# Altium footprint library NXJ2S2405MC-R7.PcbLib: 3 footprints
Each footprint in its own frame and in the unit in brackets; x right, y up, seen from the top. Pads: shape width x height; smd on the part's side, far side on the other; paste and mask are expansions set on the pad; w line width, h text height; cw(c..) or ccw(c..) is an arc to the next point about the centre after c.
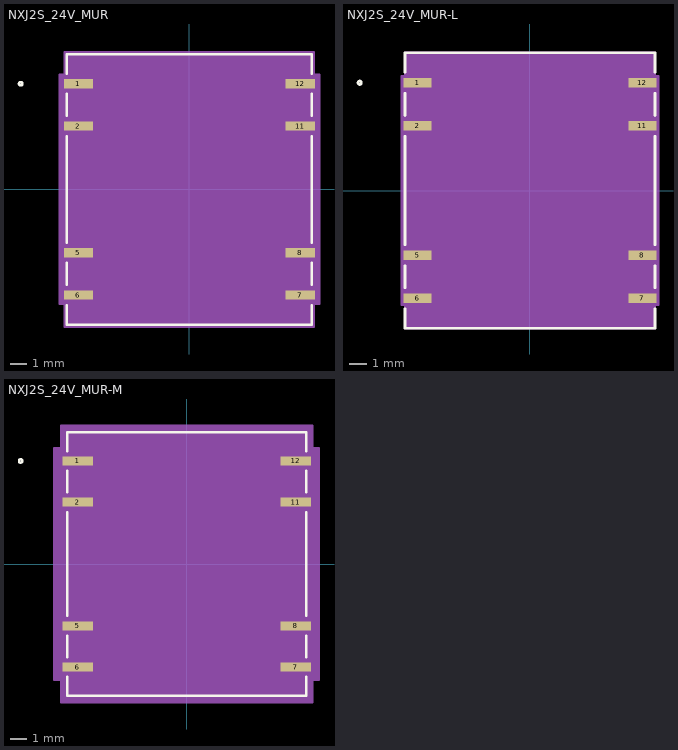
[diagram p0: the footprints below, top view; thin cyan lines are the x and y axes]

## NXJ2S_24V_MUR [mil]
pads (8):
  rect 69x22 smd paste+0 mask+0: 1(-262.5,250) 2(-262.5,150) 5(-262.5,-150) 6(-262.5,-250) 7(262.5,-250) 8(262.5,-150) 11(262.5,150) 12(262.5,250)
Top Overlay:
  circle w6: c-399,250 r4
  lines w6: -290,-274.1 -290,-320 290,-320 290,-274.1 ; -290,-225.9 -290,-174.1 ; -290,-125.9 -290,125.9 ; -290,174.1 -290,225.9 ; -290,274.1 -290,320 290,320 290,274.1 ; 290,-225.9 290,-174.1 ; 290,-125.9 290,125.9 ; 290,174.1 290,225.9
  text ".Designator" at -137.5,-25 h50
Mechanical 13:
  circle w1: c-228,250 r3
  lines w1: -12,315 ccw(c0,315) 12,315 ; -285,-315 285,-315 285,315 -285,315 -285,-315
  text ".Designator" at -137.5,-25 h50
Mechanical 15:
  region: -295,-271 -307,-271 -307,271 -295,271 -295,325 295,325 295,271 307,271 307,-271 295,-271 295,-325 -295,-325
  lines w6: -307,-271 -307,271 -295,271 -295,325 295,325 295,271 307,271 307,-271 295,-271 295,-325 -295,-325 -295,-271 -307,-271
3D body "NXJ2S_24V_MUR.step": height 191.1, standoff 0, extent -285,-315 285,315

## NXJ2S_24V_MUR-L [mil]
pads (8):
  rect 65x22 smd paste+0 mask+0: 1(-260.5,250) 2(-260.5,150) 5(-260.5,-150) 6(-260.5,-250) 7(260.5,-250) 8(260.5,-150) 11(260.5,150) 12(260.5,250)
Top Overlay:
  circle w6: c-395,250 r4
  lines w6: -290,-274.1 -290,-320 290,-320 290,-274.1 ; -290,-225.9 -290,-174.1 ; -290,-125.9 -290,125.9 ; -290,174.1 -290,225.9 ; -290,274.1 -290,320 290,320 290,274.1 ; 290,-225.9 290,-174.1 ; 290,-125.9 290,125.9 ; 290,174.1 290,225.9
  text ".Designator" at -137.5,-25 h50
Mechanical 13:
  circle w1: c-228,250 r3
  lines w1: -12,315 ccw(c0,315) 12,315 ; -285,-315 285,-315 285,315 -285,315 -285,-315
  text ".Designator" at -137.5,-25 h50
Mechanical 15:
  region: -289,-265 -297,-265 -297,265 -289,265 -289,319 289,319 289,265 297,265 297,-265 289,-265 289,-319 -289,-319
  lines w6: -297,-265 -297,265 -289,265 -289,319 289,319 289,265 297,265 297,-265 289,-265 289,-319 -289,-319 -289,-265 -297,-265
3D body "NXJ2S_24V_MUR.step": height 191.1, standoff 0, extent -285,-315 285,315

## NXJ2S_24V_MUR-M [mil]
pads (8):
  rect 73x22 smd paste+0 mask+0: 1(-264.5,250) 2(-264.5,150) 5(-264.5,-150) 6(-264.5,-250) 7(264.5,-250) 8(264.5,-150) 11(264.5,150) 12(264.5,250)
Top Overlay:
  circle w6: c-403,250 r4
  lines w6: -290,-274.1 -290,-320 290,-320 290,-274.1 ; -290,-225.9 -290,-174.1 ; -290,-125.9 -290,125.9 ; -290,174.1 -290,225.9 ; -290,274.1 -290,320 290,320 290,274.1 ; 290,-225.9 290,-174.1 ; 290,-125.9 290,125.9 ; 290,174.1 290,225.9
  text ".Designator" at -137.5,-25 h50
Mechanical 13:
  circle w1: c-228,250 r3
  lines w1: -12,315 ccw(c0,315) 12,315 ; -285,-315 285,-315 285,315 -285,315 -285,-315
  text ".Designator" at -137.5,-25 h50
Mechanical 15:
  region: -305,-281 -321,-281 -321,281 -305,281 -305,335 305,335 305,281 321,281 321,-281 305,-281 305,-335 -305,-335
  lines w6: -321,-281 -321,281 -305,281 -305,335 305,335 305,281 321,281 321,-281 305,-281 305,-335 -305,-335 -305,-281 -321,-281
3D body "NXJ2S_24V_MUR.step": height 191.1, standoff 0, extent -285,-315 285,315